# Altium footprint library WE-SHCA.PcbLib: 44 footprints (part 3 of 3)
Each footprint in its own frame and in the unit in brackets; x right, y up, seen from the top. Pads: shape width x height; smd on the part's side, far side on the other; paste and mask are expansions set on the pad; w line width, h text height; cw(c..) or ccw(c..) is an arc to the next point about the centre after c.
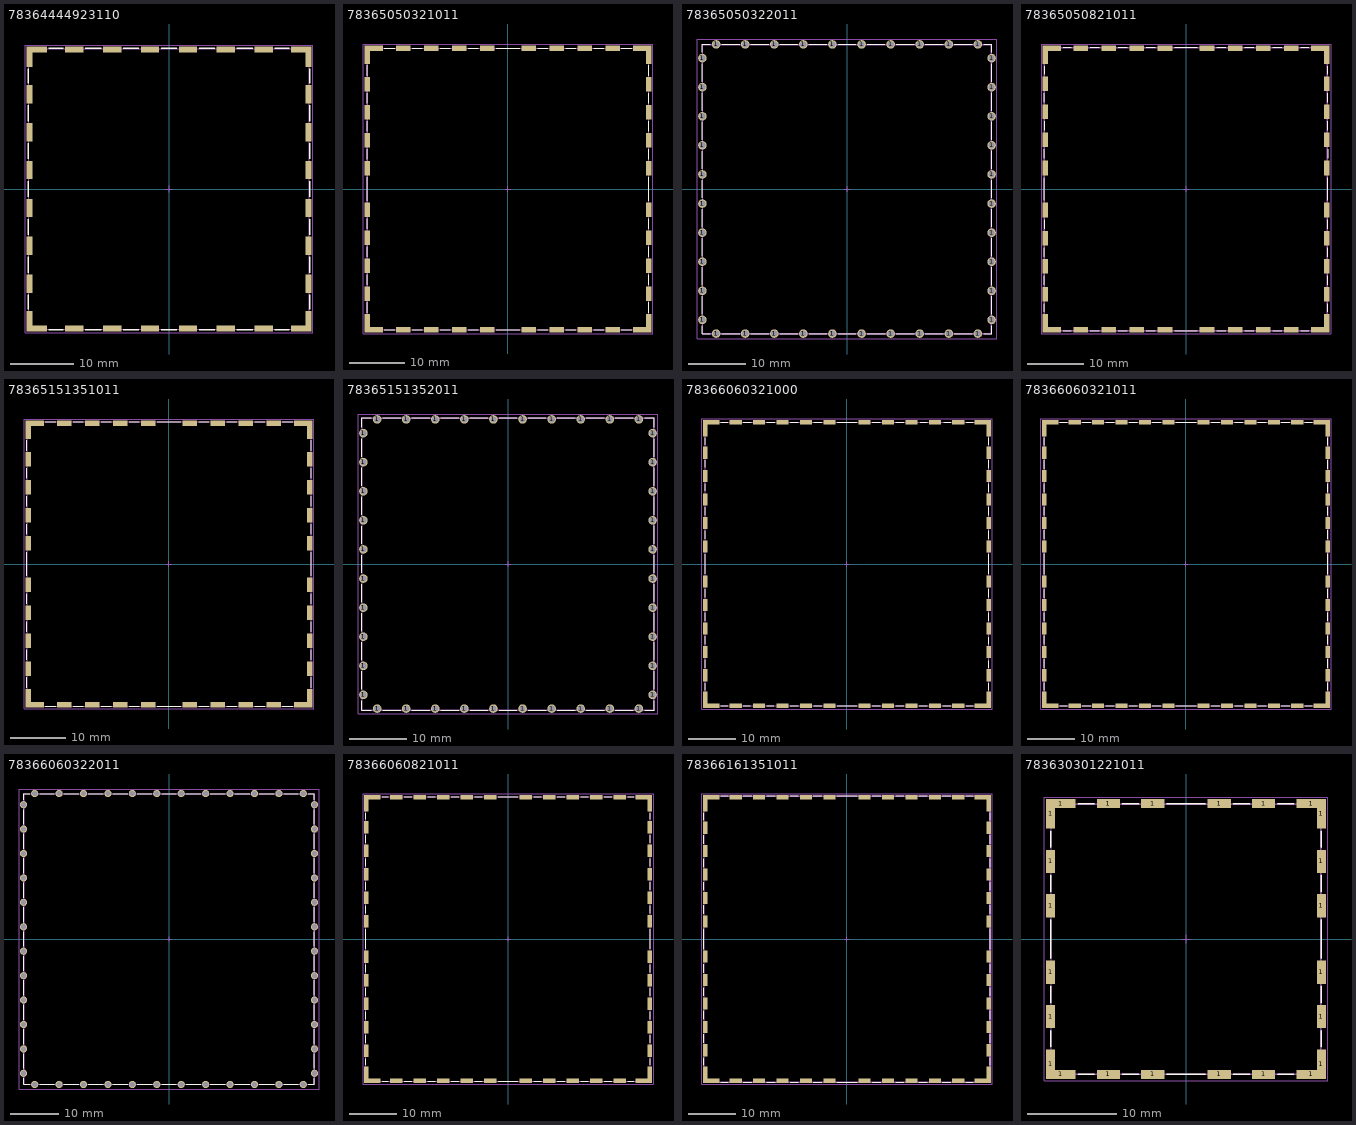
[diagram p2: the footprints below, top view; thin cyan lines are the x and y axes]

## 78364444923110 [mm] "Shielding Cabinet, body 44.37x44.37mm"
height 9.85
pads (32):
  rect 1x3.3 smd: 1(-22.08,-20.93) 1(-22.08,20.93) 1(22.08,-20.93) 1(22.08,20.93)
  rect 1x2.9 smd: 1(-22.08,-15) 1(-22.08,-9) 1(-22.08,-3) 1(-22.08,3) 1(-22.08,9) 1(-22.08,15) 1(22.08,-15) 1(22.08,-9) 1(22.08,-3) 1(22.08,3) 1(22.08,9) 1(22.08,15)
  rect 3.3x1 smd: 1(-20.93,-22.08) 1(-20.93,22.08) 1(20.93,-22.08) 1(20.93,22.08)
  rect 2.9x1 smd: 1(-15,-22.08) 1(-15,22.08) 1(-9,-22.08) 1(-9,22.08) 1(-3,-22.08) 1(-3,22.08) 1(3,-22.08) 1(3,22.08) 1(9,-22.08) 1(9,22.08) 1(15,-22.08) 1(15,22.08)
Top Overlay:
  lines w0.2: -22.235,-19 -22.235,-16.75 ; -22.235,-13.25 -22.235,-10.75 ; -22.235,-7.25 -22.235,-4.75 ; -22.235,-1.25 -22.235,1.25 ; -22.235,4.75 -22.235,7.25 ; -22.235,10.75 -22.235,13.25 ; -22.235,16.75 -22.235,19 ; -19,-22.235 -16.75,-22.235 ; -19,22.235 -16.75,22.235 ; -13.25,-22.235 -10.75,-22.235 ; -13.25,22.235 -10.75,22.235 ; -7.25,-22.235 -4.75,-22.235 ; -7.25,22.235 -4.75,22.235 ; -1.25,-22.235 1.25,-22.235 ; -1.25,22.235 1.25,22.235 ; 4.75,-22.235 7.25,-22.235 ; 4.75,22.235 7.25,22.235 ; 10.75,-22.235 13.25,-22.235 ; 10.75,22.235 13.25,22.235 ; 16.75,-22.235 19,-22.235 ; 16.75,22.235 19,22.235 ; 22.235,-19 22.235,-16.75 ; 22.235,-13.25 22.235,-10.75 ; 22.235,-7.25 22.235,-4.75 ; 22.235,-1.25 22.235,1.25 ; 22.235,4.75 22.235,7.25 ; 22.235,10.75 22.235,13.25 ; 22.235,16.75 22.235,19
Top Assembly:
  lines w0.1: -22.185,-22.185 22.185,-22.185 22.185,22.185 -22.185,22.185 -22.185,-22.185
Top Designator:
  text ".Designator" at -3.647,-0.357 h1
Top 3D Body:
  lines w0.1: -22.185,-22.185 -22.185,22.185 22.185,22.185 22.185,-22.185 -22.185,-22.185
Top Courtyard:
  lines w0.05: -22.78,-22.78 22.78,-22.78 22.78,0 22.78,22.78 -22.78,22.78 -22.78,-22.78
Top Component Center:
  lines w0.1: -0.5,0 0.5,0 ; 0,-0.5 0,0.5
3D body "36907406S.stp": height 9.75, standoff 0, extent -22.185,-22.185 22.185,22.185

## 78365050321011 [mm] "Shielding Cabinet, SMD Frame, 50.4x50.4mm"
height 3.2
pads (40):
  rect 1x3.3 smd: 1(-25.25,-24.1) 1(-25.25,24.1) 1(25.25,-24.1) 1(25.25,24.1)
  rect 1x2.6 smd: 1(-25.25,-18.75) 1(-25.25,-13.75) 1(-25.25,-8.75) 1(-25.25,-3.75) 1(-25.25,3.75) 1(-25.25,8.75) 1(-25.25,13.75) 1(-25.25,18.75) 1(25.25,-18.75) 1(25.25,-13.75) 1(25.25,-8.75) 1(25.25,-3.75) 1(25.25,3.75) 1(25.25,8.75) 1(25.25,13.75) 1(25.25,18.75)
  rect 3.3x1 smd: 1(-24.1,-25.25) 1(-24.1,25.25) 1(24.1,-25.25) 1(24.1,25.25)
  rect 2.6x1 smd: 1(-18.75,-25.25) 1(-18.75,25.25) 1(-13.75,-25.25) 1(-13.75,25.25) 1(-8.75,-25.25) 1(-8.75,25.25) 1(-3.75,-25.25) 1(-3.75,25.25) 1(3.75,-25.25) 1(3.75,25.25) 1(8.75,-25.25) 1(8.75,25.25) 1(13.75,-25.25) 1(13.75,25.25) 1(18.75,-25.25) 1(18.75,25.25)
Top Overlay:
  lines w0.2: -25.25,-22.15 -25.25,-20.35 ; -25.25,-17.15 -25.25,-15.35 ; -25.25,-12.15 -25.25,-10.35 ; -25.25,-7.15 -25.25,-5.35 ; -25.25,-2.15 -25.25,2.15 ; -25.25,5.35 -25.25,7.15 ; -25.25,10.35 -25.25,12.15 ; -25.25,15.35 -25.25,17.15 ; -25.25,20.35 -25.25,22.15 ; -22.15,-25.25 -20.35,-25.25 ; -22.15,25.25 -20.35,25.25 ; -17.15,-25.25 -15.35,-25.25 ; -17.15,25.25 -15.35,25.25 ; -12.15,-25.25 -10.35,-25.25 ; -12.15,25.25 -10.35,25.25 ; -7.15,-25.25 -5.35,-25.25 ; -7.15,25.25 -5.35,25.25 ; -2.15,-25.25 2.15,-25.25 ; -2.15,25.25 2.15,25.25 ; 5.35,-25.25 7.15,-25.25 ; 5.35,25.25 7.15,25.25 ; 10.35,-25.25 12.15,-25.25 ; 10.35,25.25 12.15,25.25 ; 15.35,-25.25 17.15,-25.25 ; 15.35,25.25 17.15,25.25 ; 20.35,-25.25 22.15,-25.25 ; 20.35,25.25 22.15,25.25 ; 25.25,-22.15 25.25,-20.35 ; 25.25,-17.15 25.25,-15.35 ; 25.25,-12.15 25.25,-10.35 ; 25.25,-7.15 25.25,-5.35 ; 25.25,-2.15 25.25,2.15 ; 25.25,5.35 25.25,7.15 ; 25.25,10.35 25.25,12.15 ; 25.25,15.35 25.25,17.15 ; 25.25,20.35 25.25,22.15
Top Assembly:
  lines w0.1: -25.25,-25.25 -25.25,25.25 25.25,25.25 25.25,-25.25 -25.25,-25.25
Top Designator:
  text ".Designator" at -3.647,-0.357 h1
Top 3D Body:
  lines w0.1: -25.2,-25.2 25.2,-25.2 25.2,25.2 -25.2,25.2 -25.2,-25.2
Top Courtyard:
  lines w0.05: -25.95,-25.95 -25.95,25.95 25.95,25.95 25.95,-25.95 -25.95,-25.95
Top Component Center:
  lines w0.1: -0.5,0 0.5,0 ; 0,-0.5 0,0.5
3D body "78365050321011.stp": height 3.2, standoff 0, extent -25.2,-25.2 25.2,25.2

## 78365050322011 [mm] "Shielding Cabinet, THT Frame, body 50.4x50.4mm"
height 3.3
pads (40):
  round 1.5 hole 1.1: 1(-25.25,-22.86) 1(-25.25,-17.78) 1(-25.25,-12.7) 1(-25.25,-7.62) 1(-25.25,-2.54) 1(-25.25,2.54) 1(-25.25,7.62) 1(-25.25,12.7) 1(-25.25,17.78) 1(-25.25,22.86) 1(-22.86,-25.25) 1(-22.86,25.25) 1(-17.78,-25.25) 1(-17.78,25.25) 1(-12.7,-25.25) 1(-12.7,25.25) 1(-7.62,-25.25) 1(-7.62,25.25) 1(-2.54,-25.25) 1(-2.54,25.25) 1(2.54,-25.25) 1(2.54,25.25) 1(7.62,-25.25) 1(7.62,25.25) 1(12.7,-25.25) 1(12.7,25.25) 1(17.78,-25.25) 1(17.78,25.25) 1(22.86,-25.25) 1(22.86,25.25) 1(25.25,-22.86) 1(25.25,-17.78) 1(25.25,-12.7) 1(25.25,-7.62) 1(25.25,-2.54) 1(25.25,2.54) 1(25.25,7.62) 1(25.25,12.7) 1(25.25,17.78) 1(25.25,22.86)
Top Overlay:
  lines w0.2: -25.25,-23.85 -25.25,-25.25 -23.85,-25.25 ; -25.25,-21.87 -25.25,-18.75 ; -25.25,-16.81 -25.25,-13.69 ; -25.25,-11.73 -25.25,-8.61 ; -25.25,-6.65 -25.25,-3.53 ; -25.25,-1.57 -25.25,1.55 ; -25.25,3.51 -25.25,6.63 ; -25.25,8.59 -25.25,11.71 ; -25.25,13.67 -25.25,16.79 ; -25.25,18.75 -25.25,21.87 ; -25.25,23.85 -25.25,25.25 -23.85,25.25 ; -21.87,-25.25 -18.75,-25.25 ; -21.87,25.25 -18.75,25.25 ; -16.81,25.25 -13.69,25.25 ; -16.79,-25.25 -13.67,-25.25 ; -11.73,25.25 -8.61,25.25 ; -11.71,-25.25 -8.59,-25.25 ; -6.65,25.25 -3.53,25.25 ; -6.63,-25.25 -3.51,-25.25 ; -1.57,25.25 1.55,25.25 ; -1.55,-25.25 1.57,-25.25 ; 3.51,25.25 6.63,25.25 ; 3.53,-25.25 6.65,-25.25 ; 8.59,25.25 11.71,25.25 ; 8.61,-25.25 11.73,-25.25 ; 13.67,25.25 16.79,25.25 ; 13.69,-25.25 16.81,-25.25 ; 18.75,-25.25 21.87,-25.25 ; 18.75,25.25 21.87,25.25 ; 23.85,-25.25 25.25,-25.25 25.25,-23.85 ; 23.85,25.25 25.25,25.25 25.25,23.85 ; 25.25,-21.87 25.25,-18.75 ; 25.25,-16.79 25.25,-13.67 ; 25.25,-11.71 25.25,-8.59 ; 25.25,-6.63 25.25,-3.51 ; 25.25,-1.55 25.25,1.57 ; 25.25,3.53 25.25,6.65 ; 25.25,8.61 25.25,11.73 ; 25.25,13.69 25.25,16.81 ; 25.25,18.75 25.25,21.87
Top Assembly:
  lines w0.1: -25.25,-25.25 25.25,-25.25 25.25,25.25 -25.25,25.25 -25.25,-25.25
Top Designator:
  text ".Designator" at -3.647,-0.357 h1
Top 3D Body:
  lines w0.1: -25.2,-25.2 -25.2,25.2 25.2,25.2 25.2,-25.2 -25.2,-25.2
Top Courtyard:
  lines w0.05: -26.2,-26.2 26.2,-26.2 26.2,26.2 -26.2,26.2 -26.2,-26.2
Top Component Center:
  lines w0.1: -0.5,0 0.5,0 ; 0,-0.5 0,0.5
3D body "36503505S.stp": height 3.23, standoff -2.87, extent -25.2,-25.2 25.2,25.2

## 78365050821011 [mm] "WE-SHC Shielding Cabinet"
height 8
pads (40):
  rect 1x2.6 smd: 1(-25.1,-18.75) 1(-25.1,-8.75) 1(-25.1,-3.75) 1(-25.1,3.75) 1(-25.1,8.75) 1(-25.1,13.75) 1(-25.1,18.75) 1(-25.1,-13.75) 1(25.1,-13.75) 1(25.1,13.75) 1(25.1,-18.75) 1(25.1,-8.75) 1(25.1,-3.75) 1(25.1,3.75) 1(25.1,8.75) 1(25.1,18.75)
  rect 1x3.3 smd: 1(-25.1,-23.95) 1(-25.1,23.95) 1(25.1,-23.95) 1(25.1,23.95)
  rect 3.3x1 smd: 1(-23.95,-25.1) 1(-23.95,25.1) 1(23.95,-25.1) 1(23.95,25.1)
  rect 2.6x1 smd: 1(-18.75,-25.1) 1(-18.75,25.1) 1(-13.75,-25.1) 1(-13.75,25.1) 1(-8.75,-25.1) 1(-8.75,25.1) 1(-3.75,25.1) 1(-3.75,-25.1) 1(3.75,-25.1) 1(3.75,25.1) 1(8.75,-25.1) 1(8.75,25.1) 1(13.75,-25.1) 1(13.75,25.1) 1(18.75,-25.1) 1(18.75,25.1)
Top Overlay:
  lines w0.2: -25.25,-21.9 -25.25,-20.45 ; -25.25,-17.05 -25.25,-15.45 ; -25.25,-12.05 -25.25,-10.45 ; -25.25,-7.05 -25.25,-5.45 ; -25.25,-2.05 -25.25,2.05 ; -25.25,5.45 -25.25,7.05 ; -25.25,10.45 -25.25,12.05 ; -25.25,15.45 -25.25,17.05 ; -25.25,20.45 -25.25,21.9 ; -21.9,-25.25 -20.45,-25.25 ; -21.9,25.25 -20.45,25.25 ; -17.05,-25.25 -15.45,-25.25 ; -17.05,25.25 -15.45,25.25 ; -12.05,-25.25 -10.45,-25.25 ; -12.05,25.25 -10.45,25.25 ; -7.05,-25.25 -5.45,-25.25 ; -7.05,25.25 -5.45,25.25 ; -2.05,-25.25 2.05,-25.25 ; -2.05,25.25 2.05,25.25 ; 5.45,-25.25 7.05,-25.25 ; 5.45,25.25 7.05,25.25 ; 10.45,-25.25 12.05,-25.25 ; 10.45,25.25 12.05,25.25 ; 15.45,-25.25 17.05,-25.25 ; 15.45,25.25 17.05,25.25 ; 20.45,-25.25 21.9,-25.25 ; 20.45,25.25 21.9,25.25 ; 25.25,-21.9 25.25,-20.45 ; 25.25,-17.05 25.25,-15.45 ; 25.25,-12.05 25.25,-10.45 ; 25.25,-7.05 25.25,-5.45 ; 25.25,-2.05 25.25,2.05 ; 25.25,5.45 25.25,7.05 ; 25.25,10.45 25.25,12.05 ; 25.25,15.45 25.25,17.05 ; 25.25,20.45 25.25,21.9
Top Assembly:
  lines w0.1: -25.25,-25.25 -25.25,25.25 25.25,25.25 25.25,-25.25 -25.25,-25.25
Top Designator:
  text ".Designator" at -3.647,-0.357 h1
Top 3D Body:
  lines w0.1: -25.2,-25.2 -25.2,25.2 25.2,25.2 25.2,-25.2 -25.2,-25.2
Top Courtyard:
  lines w0.05: -25.8,-25.8 -25.8,25.8 25.8,25.8 25.8,-25.8 -25.8,-25.8
Top Component Center:
  lines w0.1: -0.5,0 0.5,0 ; 0,-0.5 0,0.5
3D body "78365050821011.stp": height 8, standoff 0, extent -25.2,-25.2 25.2,25.2

## 78365151351011 [mm] "Shielding Cabinet, SMD Frame, body 51x51mm"
height 3.6
pads (40):
  rect 1x3.3 smd: 1(-25.25,-24.1) 1(-25.25,24.1) 1(25.25,-24.1) 1(25.25,24.1)
  rect 1x2.6 smd: 1(-25.25,-18.75) 1(-25.25,-13.75) 1(-25.25,-8.75) 1(-25.25,-3.75) 1(-25.25,3.75) 1(-25.25,8.75) 1(-25.25,13.75) 1(-25.25,18.75) 1(25.25,-18.75) 1(25.25,-13.75) 1(25.25,-8.75) 1(25.25,-3.75) 1(25.25,3.75) 1(25.25,8.75) 1(25.25,13.75) 1(25.25,18.75)
  rect 3.3x1 smd: 1(-24.1,-25.25) 1(-24.1,25.25) 1(24.1,-25.25) 1(24.1,25.25)
  rect 2.6x1 smd: 1(-18.75,-25.25) 1(-18.75,25.25) 1(-13.75,-25.25) 1(-13.75,25.25) 1(-8.75,-25.25) 1(-8.75,25.25) 1(-3.75,-25.25) 1(-3.75,25.25) 1(3.75,-25.25) 1(3.75,25.25) 1(8.75,-25.25) 1(8.75,25.25) 1(13.75,-25.25) 1(13.75,25.25) 1(18.75,-25.25) 1(18.75,25.25)
Top Overlay:
  lines w0.2: -25.55,-22.15 -25.55,-20.35 ; -25.55,-17.15 -25.55,-15.35 ; -25.55,-12.15 -25.55,-10.35 ; -25.55,-7.15 -25.55,-5.35 ; -25.55,-2.15 -25.55,2.15 ; -25.55,5.35 -25.55,7.15 ; -25.55,10.35 -25.55,12.15 ; -25.55,15.35 -25.55,17.15 ; -25.55,20.35 -25.55,22.15 ; -22.15,-25.55 -20.35,-25.55 ; -22.15,25.55 -20.35,25.55 ; -17.15,-25.55 -15.35,-25.55 ; -17.15,25.55 -15.35,25.55 ; -12.15,-25.55 -10.35,-25.55 ; -12.15,25.55 -10.35,25.55 ; -7.15,-25.55 -5.35,-25.55 ; -7.15,25.55 -5.35,25.55 ; -2.15,-25.55 2.15,-25.55 ; -2.15,25.55 2.15,25.55 ; 5.35,-25.55 7.15,-25.55 ; 5.35,25.55 7.15,25.55 ; 10.35,-25.55 12.15,-25.55 ; 10.35,25.55 12.15,25.55 ; 15.35,-25.55 17.15,-25.55 ; 15.35,25.55 17.15,25.55 ; 20.35,-25.55 22.15,-25.55 ; 20.35,25.55 22.15,25.55 ; 25.55,-22.15 25.55,-20.35 ; 25.55,-17.15 25.55,-15.35 ; 25.55,-12.15 25.55,-10.35 ; 25.55,-7.15 25.55,-5.35 ; 25.55,-2.15 25.55,2.15 ; 25.55,5.35 25.55,7.15 ; 25.55,10.35 25.55,12.15 ; 25.55,15.35 25.55,17.15 ; 25.55,20.35 25.55,22.15
Top Assembly:
  lines w0.1: -25.55,-25.55 -25.55,25.55 25.55,25.55 25.55,-25.55 -25.55,-25.55
Top Designator:
  text ".Designator" at -3.647,-0.357 h1
Top 3D Body:
  lines w0.1: -25.5,-25.5 25.5,-25.5 25.5,25.5 -25.5,25.5 -25.5,-25.5
Top Courtyard:
  lines w0.05: -25.95,-25.95 25.95,-25.95 25.95,25.95 -25.95,25.95 -25.95,-25.95
Top Component Center:
  lines w0.1: -0.5,0 0.5,0 ; 0,-0.5 0,0.5
3D body "78365151351011.stp": height 3.5, standoff 0, extent -25.5,-25.5 25.5,25.5

## 78365151352011 [mm] "Shielding Cabinet, THT Frame, body 51x51mm"
height 3.6
pads (40):
  round 1.5 hole 1.1: 1(-25.25,-22.86) 1(-25.25,-17.78) 1(-25.25,-12.7) 1(-25.25,-7.62) 1(-25.25,-2.54) 1(-25.25,2.54) 1(-25.25,7.62) 1(-25.25,12.7) 1(-25.25,17.78) 1(-25.25,22.86) 1(-22.86,-25.25) 1(-22.86,25.25) 1(-17.78,-25.25) 1(-17.78,25.25) 1(-12.7,-25.25) 1(-12.7,25.25) 1(-7.62,-25.25) 1(-7.62,25.25) 1(-2.54,-25.25) 1(-2.54,25.25) 1(2.54,-25.25) 1(2.54,25.25) 1(7.62,-25.25) 1(7.62,25.25) 1(12.7,-25.25) 1(12.7,25.25) 1(17.78,-25.25) 1(17.78,25.25) 1(22.86,-25.25) 1(22.86,25.25) 1(25.25,-22.86) 1(25.25,-17.78) 1(25.25,-12.7) 1(25.25,-7.62) 1(25.25,-2.54) 1(25.25,2.54) 1(25.25,7.62) 1(25.25,12.7) 1(25.25,17.78) 1(25.25,22.86)
Top Overlay:
  lines w0.2: -25.55,-23.85 -25.55,-25.55 -23.85,-25.55 ; -25.55,-21.87 -25.55,-18.75 ; -25.55,-16.81 -25.55,-13.69 ; -25.55,-11.73 -25.55,-8.61 ; -25.55,-6.65 -25.55,-3.53 ; -25.55,-1.57 -25.55,1.55 ; -25.55,3.51 -25.55,6.63 ; -25.55,8.59 -25.55,11.71 ; -25.55,13.67 -25.55,16.79 ; -25.55,18.75 -25.55,21.87 ; -25.55,23.85 -25.55,25.55 -23.85,25.55 ; -21.87,-25.55 -18.75,-25.55 ; -21.87,25.55 -18.75,25.55 ; -16.81,25.55 -13.69,25.55 ; -16.79,-25.55 -13.67,-25.55 ; -11.73,25.55 -8.61,25.55 ; -11.71,-25.55 -8.59,-25.55 ; -6.65,25.55 -3.53,25.55 ; -6.63,-25.55 -3.51,-25.55 ; -1.57,25.55 1.55,25.55 ; -1.55,-25.55 1.57,-25.55 ; 3.51,25.55 6.63,25.55 ; 3.53,-25.55 6.65,-25.55 ; 8.59,25.55 11.71,25.55 ; 8.61,-25.55 11.73,-25.55 ; 13.67,25.55 16.79,25.55 ; 13.69,-25.55 16.81,-25.55 ; 18.75,-25.55 21.87,-25.55 ; 18.75,25.55 21.87,25.55 ; 23.85,-25.55 25.55,-25.55 25.55,-23.85 ; 23.85,25.55 25.55,25.55 25.55,23.85 ; 25.55,-21.87 25.55,-18.75 ; 25.55,-16.79 25.55,-13.67 ; 25.55,-11.71 25.55,-8.59 ; 25.55,-6.63 25.55,-3.51 ; 25.55,-1.55 25.55,1.57 ; 25.55,3.53 25.55,6.65 ; 25.55,8.61 25.55,11.73 ; 25.55,13.69 25.55,16.81 ; 25.55,18.75 25.55,21.87
Top Assembly:
  lines w0.1: -25.55,-25.55 25.55,-25.55 25.55,25.55 -25.55,25.55 -25.55,-25.55
Top Designator:
  text ".Designator" at -3.647,-0.357 h1
Top 3D Body:
  lines w0.1: -25.5,-25.5 -25.5,25.5 25.5,25.5 25.5,-25.5 -25.5,-25.5
Top Courtyard:
  lines w0.05: -26.2,-26.2 26.2,-26.2 26.2,26.2 -26.2,26.2 -26.2,-26.2
Top Component Center:
  lines w0.1: -0.5,0 0.5,0 ; 0,-0.5 0,0.5
3D body "78365151352011.stp": height 3.5, standoff -2.9, extent -25.5,-25.5 25.5,25.5

## 78366060321000 [mm] "Shielding Cabinet, SMD Frame, body 60.4 x 60.4 mm"
height 3.2
pads (48):
  rect 1x3.5 smd: 1(-30.25,-29) 1(-30.25,29) 1(30.25,-29) 1(30.25,29)
  rect 1x2.6 smd: 1(-30.25,-23.75) 1(-30.25,-18.75) 1(-30.25,-13.75) 1(-30.25,-8.75) 1(-30.25,-3.75) 1(-30.25,3.75) 1(-30.25,8.75) 1(-30.25,13.75) 1(-30.25,18.75) 1(-30.25,23.75) 1(30.25,-23.75) 1(30.25,-18.75) 1(30.25,-13.75) 1(30.25,-8.75) 1(30.25,-3.75) 1(30.25,3.75) 1(30.25,8.75) 1(30.25,13.75) 1(30.25,18.75) 1(30.25,23.75)
  rect 3.5x1 smd: 1(-29,-30.25) 1(-29,30.25) 1(29,-30.25) 1(29,30.25)
  rect 2.6x1 smd: 1(-23.75,-30.25) 1(-23.75,30.25) 1(-18.75,-30.25) 1(-18.75,30.25) 1(-13.75,-30.25) 1(-13.75,30.25) 1(-8.75,-30.25) 1(-8.75,30.25) 1(-3.75,-30.25) 1(-3.75,30.25) 1(3.75,-30.25) 1(3.75,30.25) 1(8.75,-30.25) 1(8.75,30.25) 1(13.75,-30.25) 1(13.75,30.25) 1(18.75,-30.25) 1(18.75,30.25) 1(23.75,-30.25) 1(23.75,30.25)
Top Overlay:
  lines w0.2: -30.25,-26.9 -30.25,-25.4 ; -30.25,-22.1 -30.25,-20.4 ; -30.25,-17.1 -30.25,-15.4 ; -30.25,-12.1 -30.25,-10.4 ; -30.25,-7.1 -30.25,-5.4 ; -30.25,-2.1 -30.25,2.1 ; -30.25,5.4 -30.25,7.1 ; -30.25,10.4 -30.25,12.1 ; -30.25,15.6 -30.25,17.1 ; -30.25,20.6 -30.25,22.1 ; -30.25,25.4 -30.25,26.9 ; -26.9,-30.25 -25.4,-30.25 ; -26.9,30.25 -25.4,30.25 ; -22.1,-30.25 -20.6,-30.25 ; -22.1,30.25 -20.4,30.25 ; -17.1,-30.25 -15.6,-30.25 ; -17.1,30.25 -15.4,30.25 ; -12.1,-30.25 -10.4,-30.25 ; -12.1,30.25 -10.4,30.25 ; -7.1,-30.25 -5.4,-30.25 ; -7.1,30.25 -5.4,30.25 ; -2.1,-30.25 2.1,-30.25 ; -2.1,30.25 2.1,30.25 ; 5.4,-30.25 7.1,-30.25 ; 5.4,30.25 7.1,30.25 ; 10.4,-30.25 12.1,-30.25 ; 10.4,30.25 12.1,30.25 ; 15.4,-30.25 17.1,-30.25 ; 15.6,30.25 17.1,30.25 ; 20.4,-30.25 22.1,-30.25 ; 20.6,30.25 22.1,30.25 ; 25.4,-30.25 26.9,-30.25 ; 25.4,30.25 26.9,30.25 ; 30.25,-26.9 30.25,-25.4 ; 30.25,-22.1 30.25,-20.6 ; 30.25,-17.1 30.25,-15.6 ; 30.25,-12.1 30.25,-10.4 ; 30.25,-7.1 30.25,-5.4 ; 30.25,-2.1 30.25,2.1 ; 30.25,5.4 30.25,7.1 ; 30.25,10.4 30.25,12.1 ; 30.25,15.4 30.25,17.1 ; 30.25,20.4 30.25,22.1 ; 30.25,25.4 30.25,26.9
Top Assembly:
  lines w0.1: -30.25,-30.25 -30.25,30.25 30.25,30.25 30.25,-30.25 -30.25,-30.25
Top Designator:
  text ".Designator" at -3.647,-0.357 h1
Top 3D Body:
  lines w0.1: -30.2,-30.2 -30.2,30.2 30.2,30.2 30.2,-30.2 -30.2,-30.2
Top Courtyard:
  lines w0.05: -30.95,-30.95 -30.95,30.95 30.95,30.95 30.95,-30.95 -30.95,-30.95
Top Component Center:
  lines w0.1: -0.5,0 0.5,0 ; 0,-0.5 0,0.5
3D body "78366060321000.stp": height 3.22, standoff 0.02, extent -30.2,-30 30.2,30

## 78366060321011 [mm] "Shielding Cabinet, SMD Frame, 60.4x60.4mm"
height 3.5
pads (48):
  rect 1x3.5 smd: 1(-30.25,-29) 1(-30.25,29) 1(30.25,-29) 1(30.25,29)
  rect 1x2.6 smd: 1(-30.25,-23.75) 1(-30.25,-18.75) 1(-30.25,-13.75) 1(-30.25,-8.75) 1(-30.25,-3.75) 1(-30.25,3.75) 1(-30.25,8.75) 1(-30.25,13.75) 1(-30.25,18.75) 1(-30.25,23.75) 1(30.25,-23.75) 1(30.25,-18.75) 1(30.25,-13.75) 1(30.25,-8.75) 1(30.25,-3.75) 1(30.25,3.75) 1(30.25,8.75) 1(30.25,13.75) 1(30.25,18.75) 1(30.25,23.75)
  rect 3.5x1 smd: 1(-29,-30.25) 1(-29,30.25) 1(29,-30.25) 1(29,30.25)
  rect 2.6x1 smd: 1(-23.75,-30.25) 1(-23.75,30.25) 1(-18.75,-30.25) 1(-18.75,30.25) 1(-13.75,-30.25) 1(-13.75,30.25) 1(-8.75,-30.25) 1(-8.75,30.25) 1(-3.75,-30.25) 1(-3.75,30.25) 1(3.75,-30.25) 1(3.75,30.25) 1(8.75,-30.25) 1(8.75,30.25) 1(13.75,-30.25) 1(13.75,30.25) 1(18.75,-30.25) 1(18.75,30.25) 1(23.75,-30.25) 1(23.75,30.25)
Top Overlay:
  lines w0.2: -30.25,-26.95 -30.25,-25.35 ; -30.25,-22.15 -30.25,-20.35 ; -30.25,-17.15 -30.25,-15.35 ; -30.25,-12.15 -30.25,-10.35 ; -30.25,-7.15 -30.25,-5.35 ; -30.25,-2.15 -30.25,2.15 ; -30.25,5.35 -30.25,7.15 ; -30.25,10.35 -30.25,12.15 ; -30.25,15.35 -30.25,17.15 ; -30.25,20.35 -30.25,22.15 ; -30.25,25.35 -30.25,26.95 ; -26.95,-30.25 -25.35,-30.25 ; -26.95,30.25 -25.35,30.25 ; -22.15,-30.25 -20.35,-30.25 ; -22.15,30.25 -20.35,30.25 ; -17.15,-30.25 -15.35,-30.25 ; -17.15,30.25 -15.35,30.25 ; -12.15,-30.25 -10.35,-30.25 ; -12.15,30.25 -10.35,30.25 ; -7.15,-30.25 -5.35,-30.25 ; -7.15,30.25 -5.35,30.25 ; -2.15,-30.25 2.15,-30.25 ; -2.15,30.25 2.15,30.25 ; 5.35,-30.25 7.15,-30.25 ; 5.35,30.25 7.15,30.25 ; 10.35,-30.25 12.15,-30.25 ; 10.35,30.25 12.15,30.25 ; 15.35,-30.25 17.15,-30.25 ; 15.35,30.25 17.15,30.25 ; 20.35,-30.25 22.15,-30.25 ; 20.35,30.25 22.15,30.25 ; 25.35,-30.25 26.95,-30.25 ; 25.35,30.25 26.95,30.25 ; 30.25,-26.95 30.25,-25.35 ; 30.25,-22.15 30.25,-20.35 ; 30.25,-17.15 30.25,-15.35 ; 30.25,-12.15 30.25,-10.35 ; 30.25,-7.15 30.25,-5.35 ; 30.25,-2.15 30.25,2.15 ; 30.25,5.35 30.25,7.15 ; 30.25,10.35 30.25,12.15 ; 30.25,15.35 30.25,17.15 ; 30.25,20.35 30.25,22.15 ; 30.25,25.35 30.25,26.95
Top Assembly:
  lines w0.1: -30.25,-30.25 30.25,-30.25 30.25,30.25 -30.25,30.25 -30.25,-30.25
Top Designator:
  text ".Designator" at -3.647,-0.357 h1
Top 3D Body:
  lines w0.1: -30.2,-30.2 -30.2,30.2 30.2,30.2 30.2,-30.2 -30.2,-30.2
Top Courtyard:
  lines w0.05: -30.95,-30.95 -30.95,30.95 30.95,30.95 30.95,-30.95 -30.95,-30.95
Top Component Center:
  lines w0.1: -0.5,0 0.5,0 ; 0,-0.5 0,0.5
3D body "36103605S.stp": height 3.2, standoff 0, extent -30.2,-30.2 30.2,30.2

## 78366060322011 [mm] "Shielding Cabinet, THT Frame, body 60.4x60.4mm"
height 3.3
pads (48):
  round 1.5 hole 1.1: 1(-30.25,-27.94) 1(-30.25,-22.86) 1(-30.25,-17.78) 1(-30.25,-12.7) 1(-30.25,-7.62) 1(-30.25,-2.54) 1(-30.25,2.54) 1(-30.25,7.62) 1(-30.25,12.7) 1(-30.25,17.78) 1(-30.25,22.86) 1(-30.25,27.94) 1(-27.94,-30.25) 1(-27.94,30.25) 1(-22.86,-30.25) 1(-22.86,30.25) 1(-17.78,-30.25) 1(-17.78,30.25) 1(-12.7,-30.25) 1(-12.7,30.25) 1(-7.62,-30.25) 1(-7.62,30.25) 1(-2.54,-30.25) 1(-2.54,30.25) 1(2.54,-30.25) 1(2.54,30.25) 1(7.62,-30.25) 1(7.62,30.25) 1(12.7,-30.25) 1(12.7,30.25) 1(17.78,-30.25) 1(17.78,30.25) 1(22.86,-30.25) 1(22.86,30.25) 1(27.94,-30.25) 1(27.94,30.25) 1(30.25,-27.94) 1(30.25,-22.86) 1(30.25,-17.78) 1(30.25,-12.7) 1(30.25,-7.62) 1(30.25,-2.54) 1(30.25,2.54) 1(30.25,7.62) 1(30.25,12.7) 1(30.25,17.78) 1(30.25,22.86) 1(30.25,27.94)
Top Overlay:
  lines w0.2: -30.25,-28.95 -30.25,-30.25 -28.95,-30.25 ; -30.25,-26.93 -30.25,-23.85 ; -30.25,-21.87 -30.25,-18.79 ; -30.25,-16.79 -30.25,-13.71 ; -30.25,-11.71 -30.25,-8.63 ; -30.25,-6.63 -30.25,-3.55 ; -30.25,-1.55 -30.25,1.53 ; -30.25,3.53 -30.25,6.61 ; -30.25,8.61 -30.25,11.69 ; -30.25,13.69 -30.25,16.77 ; -30.25,18.77 -30.25,21.85 ; -30.25,23.85 -30.25,26.93 ; -30.25,28.95 -30.25,30.25 -28.95,30.25 ; -26.93,-30.25 -23.85,-30.25 ; -26.93,30.25 -23.85,30.25 ; -21.87,30.25 -18.79,30.25 ; -21.85,-30.25 -18.77,-30.25 ; -16.79,30.25 -13.71,30.25 ; -16.77,-30.25 -13.69,-30.25 ; -11.71,30.25 -8.63,30.25 ; -11.69,-30.25 -8.61,-30.25 ; -6.63,30.25 -3.55,30.25 ; -6.61,-30.25 -3.53,-30.25 ; -1.55,30.25 1.53,30.25 ; -1.53,-30.25 1.55,-30.25 ; 3.53,30.25 6.61,30.25 ; 3.55,-30.25 6.63,-30.25 ; 8.61,30.25 11.69,30.25 ; 8.63,-30.25 11.71,-30.25 ; 13.69,30.25 16.77,30.25 ; 13.71,-30.25 16.79,-30.25 ; 18.77,30.25 21.85,30.25 ; 18.79,-30.25 21.87,-30.25 ; 23.85,-30.25 26.93,-30.25 ; 23.85,30.25 26.93,30.25 ; 28.95,-30.25 30.25,-30.25 30.25,-28.95 ; 28.95,30.25 30.25,30.25 30.25,28.95 ; 30.25,-26.93 30.25,-23.85 ; 30.25,-21.85 30.25,-18.77 ; 30.25,-16.77 30.25,-13.69 ; 30.25,-11.69 30.25,-8.61 ; 30.25,-6.61 30.25,-3.53 ; 30.25,-1.53 30.25,1.55 ; 30.25,3.55 30.25,6.63 ; 30.25,8.63 30.25,11.71 ; 30.25,13.71 30.25,16.79 ; 30.25,18.79 30.25,21.87 ; 30.25,23.85 30.25,26.93
Top Assembly:
  lines w0.1: -30.25,-30.25 -30.25,30.25 30.25,30.25 30.25,-30.25 -30.25,-30.25
Top Designator:
  text ".Designator" at -3.647,-0.357 h1
Top 3D Body:
  lines w0.1: -30.2,-30.2 30.2,-30.2 30.2,30.2 -30.2,30.2 -30.2,-30.2
Top Courtyard:
  lines w0.05: -31.2,-31.2 -31.2,31.2 31.2,31.2 31.2,-31.2 -31.2,-31.2
Top Component Center:
  lines w0.1: -0.5,0 0.5,0 ; 0,-0.5 0,0.5
3D body "36503605S.stp": height 3.2, standoff -2.9, extent -30.2,-30.2 30.2,30.2

## 78366060821011 [mm] "WE-SHC Shielding Cabinet"
height 8
pads (48):
  rect 1x2.6 smd: 1(-30.1,8.75) 1(-30.1,-23.75) 1(-30.1,-13.75) 1(-30.1,-8.75) 1(-30.1,-3.75) 1(-30.1,3.75) 1(-30.1,13.75) 1(-30.1,18.75) 1(-30.1,23.75) 1(-30.1,-18.75) 1(30.1,18.75) 1(30.1,-23.75) 1(30.1,-18.75) 1(30.1,-13.75) 1(30.1,-3.75) 1(30.1,3.75) 1(30.1,8.75) 1(30.1,13.75) 1(30.1,23.75) 1(30.1,-8.75)
  rect 1x3.5 smd: 1(-30.1,-28.85) 1(-30.1,28.85) 1(30.1,-28.85) 1(30.1,28.85)
  rect 3.5x1 smd: 1(-28.85,-30.1) 1(-28.85,30.1) 1(28.85,-30.1) 1(28.85,30.1)
  rect 2.6x1 smd: 1(-23.75,-30.1) 1(-23.75,30.1) 1(-18.75,-30.1) 1(-18.75,30.1) 1(-13.75,-30.1) 1(-13.75,30.1) 1(-8.75,-30.1) 1(-8.75,30.1) 1(-3.75,-30.1) 1(-3.75,30.1) 1(3.75,-30.1) 1(3.75,30.1) 1(8.75,-30.1) 1(8.75,30.1) 1(13.75,-30.1) 1(13.75,30.1) 1(18.75,-30.1) 1(18.75,30.1) 1(23.75,-30.1) 1(23.75,30.1)
Top Overlay:
  lines w0.2: -30.25,-26.7 -30.25,-25.45 ; -30.25,-22.05 -30.25,-20.45 ; -30.25,-17 -30.25,-15.45 ; -30.25,-12.05 -30.25,-10.45 ; -30.25,-7.05 -30.25,-5.45 ; -30.25,-2.05 -30.25,2.05 ; -30.25,5.45 -30.25,7.05 ; -30.25,10.45 -30.25,12.05 ; -30.25,17 -30.25,15.45 -30.25,17.05 ; -30.25,20.45 -30.25,22.05 ; -30.25,25.45 -30.25,26.7 ; -26.7,-30.25 -25.45,-30.25 ; -26.7,30.25 -25.45,30.25 ; -22.05,-30.25 -20.45,-30.25 ; -22.05,30.25 -20.45,30.25 ; -17,-30.25 -15.45,-30.25 ; -17,30.25 -15.45,30.25 ; -12.05,-30.25 -10.45,-30.25 ; -12.05,30.25 -10.45,30.25 ; -7.05,-30.25 -5.45,-30.25 ; -7.05,30.25 -5.45,30.25 ; -2.05,-30.25 2.05,-30.25 ; -2.05,30.25 2.05,30.25 ; 5.45,-30.25 7.05,-30.25 ; 5.45,30.25 7.05,30.25 ; 10.45,-30.25 12.05,-30.25 ; 10.45,30.25 12.05,30.25 ; 15.45,-30.25 17,-30.25 ; 15.45,30.25 17,30.25 ; 20.45,-30.25 22.05,-30.25 ; 20.45,30.25 22.05,30.25 ; 25.45,-30.25 26.7,-30.25 ; 25.45,30.25 26.7,30.25 ; 30.25,-26.7 30.25,-25.45 ; 30.25,-22.05 30.25,-20.45 ; 30.25,-17 30.25,-15.45 ; 30.25,-12.05 30.25,-10.45 ; 30.25,-7.05 30.25,-5.45 ; 30.25,-2.05 30.25,2.05 ; 30.25,5.45 30.25,7.05 ; 30.25,10.45 30.25,12.05 ; 30.25,15.45 30.25,17 ; 30.25,20.45 30.25,22.05 ; 30.25,25.45 30.25,26.7
Top Assembly:
  lines w0.1: -30.25,-30.25 -30.25,30.25 30.25,30.25 30.25,-30.25 -30.25,-30.25
Top Designator:
  text ".Designator" at -3.647,-0.357 h1
Top 3D Body:
  lines w0.1: -30.2,-30.2 -30.2,30.2 30.2,30.2 30.2,-30.2 -30.2,-30.2
Top Courtyard:
  lines w0.05: -30.8,-30.8 -30.8,30.8 30.8,30.8 30.8,-30.8 -30.8,-30.8
Top Component Center:
  lines w0.1: -0.5,0 0.5,0 ; 0,-0.5 0,0.5
3D body "78366060821011.stp": height 8, standoff 0, extent -30.2,-30.2 30.2,30.2

## 78366161351011 [mm] "Shielding Cabinet, SMD Frame, body 61x61mm"
height 3.5
pads (48):
  rect 1x3.5 smd: 1(-30.25,-29) 1(-30.25,29) 1(30.25,-29) 1(30.25,29)
  rect 1x2.6 smd: 1(-30.25,-23.75) 1(-30.25,-18.75) 1(-30.25,-13.75) 1(-30.25,-8.75) 1(-30.25,-3.75) 1(-30.25,3.75) 1(-30.25,8.75) 1(-30.25,13.75) 1(-30.25,18.75) 1(-30.25,23.75) 1(30.25,-23.75) 1(30.25,-18.75) 1(30.25,-13.75) 1(30.25,-8.75) 1(30.25,-3.75) 1(30.25,3.75) 1(30.25,8.75) 1(30.25,13.75) 1(30.25,18.75) 1(30.25,23.75)
  rect 3.5x1 smd: 1(-29,-30.25) 1(-29,30.25) 1(29,-30.25) 1(29,30.25)
  rect 2.6x1 smd: 1(-23.75,-30.25) 1(-23.75,30.25) 1(-18.75,-30.25) 1(-18.75,30.25) 1(-13.75,-30.25) 1(-13.75,30.25) 1(-8.75,-30.25) 1(-8.75,30.25) 1(-3.75,-30.25) 1(-3.75,30.25) 1(3.75,-30.25) 1(3.75,30.25) 1(8.75,-30.25) 1(8.75,30.25) 1(13.75,-30.25) 1(13.75,30.25) 1(18.75,-30.25) 1(18.75,30.25) 1(23.75,-30.25) 1(23.75,30.25)
Top Overlay:
  lines w0.2: -30.55,-26.95 -30.55,-25.35 ; -30.55,-22.15 -30.55,-20.35 ; -30.55,-17.15 -30.55,-15.35 ; -30.55,-12.15 -30.55,-10.35 ; -30.55,-7.15 -30.55,-5.35 ; -30.55,-2.15 -30.55,2.15 ; -30.55,5.35 -30.55,7.15 ; -30.55,10.35 -30.55,12.15 ; -30.55,15.35 -30.55,17.15 ; -30.55,20.35 -30.55,22.15 ; -30.55,25.35 -30.55,26.95 ; -26.95,-30.55 -25.35,-30.55 ; -26.95,30.55 -25.35,30.55 ; -22.15,-30.55 -20.35,-30.55 ; -22.15,30.55 -20.35,30.55 ; -17.15,-30.55 -15.35,-30.55 ; -17.15,30.55 -15.35,30.55 ; -12.15,-30.55 -10.35,-30.55 ; -12.15,30.55 -10.35,30.55 ; -7.15,-30.55 -5.35,-30.55 ; -7.15,30.55 -5.35,30.55 ; -2.15,-30.55 2.15,-30.55 ; -2.15,30.55 2.15,30.55 ; 5.35,-30.55 7.15,-30.55 ; 5.35,30.55 7.15,30.55 ; 10.35,-30.55 12.15,-30.55 ; 10.35,30.55 12.15,30.55 ; 15.35,-30.55 17.15,-30.55 ; 15.35,30.55 17.15,30.55 ; 20.35,-30.55 22.15,-30.55 ; 20.35,30.55 22.15,30.55 ; 25.35,-30.55 26.95,-30.55 ; 25.35,30.55 26.95,30.55 ; 30.55,-26.95 30.55,-25.35 ; 30.55,-22.15 30.55,-20.35 ; 30.55,-17.15 30.55,-15.35 ; 30.55,-12.15 30.55,-10.35 ; 30.55,-7.15 30.55,-5.35 ; 30.55,-2.15 30.55,2.15 ; 30.55,5.35 30.55,7.15 ; 30.55,10.35 30.55,12.15 ; 30.55,15.35 30.55,17.15 ; 30.55,20.35 30.55,22.15 ; 30.55,25.35 30.55,26.95
Top Assembly:
  lines w0.1: -30.55,-30.55 -30.55,30.55 30.55,30.55 30.55,-30.55 -30.55,-30.55
Top Designator:
  text ".Designator" at -3.647,-0.357 h1
Top 3D Body:
  lines w0.1: -30.5,-30.5 30.5,-30.5 30.5,30.5 -30.5,30.5 -30.5,-30.5
Top Courtyard:
  lines w0.05: -30.95,-30.95 -30.95,30.95 30.95,30.95 30.95,-30.95 -30.95,-30.95
Top Component Center:
  lines w0.1: -0.5,0 0.5,0 ; 0,-0.5 0,0.5
3D body "78366161351011.stp": height 3.5, standoff 0, extent -30.5,-30.5 30.5,30.5

## 783630301221011 [mm] "WE-SHC Shielding Cabinet"
height 12
pads (24):
  rect 1x3.3 smd: 1(-15.25,-14.1) 1(-15.25,14.1) 1(15.25,-14.1) 1(15.25,14.1)
  rect 1x2.6 smd: 1(-15.25,-8.75) 1(-15.25,-3.75) 1(-15.25,3.75) 1(-15.25,8.75) 1(15.25,-8.75) 1(15.25,-3.75) 1(15.25,3.75) 1(15.25,8.75)
  rect 3.3x1 smd: 1(-14.1,-15.25) 1(-14.1,15.25) 1(14.1,-15.25) 1(14.1,15.25)
  rect 2.6x1 smd: 1(-8.75,-15.25) 1(-8.75,15.25) 1(-3.75,-15.25) 1(-3.75,15.25) 1(3.75,-15.25) 1(3.75,15.25) 1(8.75,-15.25) 1(8.75,15.25)
Top Overlay:
  lines w0.2: -15.25,-12.15 -15.25,-10.35 ; -15.25,-7.15 -15.25,-5.35 ; -15.25,-2.15 -15.25,2.15 ; -15.25,5.35 -15.25,7.15 ; -15.25,10.35 -15.25,12.15 ; -12.15,-15.25 -10.35,-15.25 ; -12.15,15.25 -10.35,15.25 ; -7.15,-15.25 -5.35,-15.25 ; -7.15,15.25 -5.35,15.25 ; -2.15,-15.25 2.15,-15.25 ; -2.15,15.25 2.15,15.25 ; 5.35,-15.25 7.15,-15.25 ; 5.35,15.25 7.15,15.25 ; 10.35,-15.25 12.15,-15.25 ; 10.35,15.25 12.15,15.25 ; 15.25,-12.15 15.25,-10.35 ; 15.25,-7.15 15.25,-5.35 ; 15.25,-2.15 15.25,2.15 ; 15.25,5.35 15.25,7.15 ; 15.25,10.35 15.25,12.15
Top Assembly:
  lines w0.1: -15.25,-15.25 15.25,-15.25 15.25,15.25 -15.25,15.25 -15.25,-15.25
Top Designator:
  text ".Designator" at -3.647,-0.357 h1
Top 3D Body:
  lines w0.1: -15.2,-15.2 -15.2,15.2 15.2,15.2 15.2,-15.2 -15.2,-15.2
Top Courtyard:
  lines w0.05: -15.95,-15.95 15.95,-15.95 15.95,15.95 -15.95,15.95 -15.95,-15.95
Top Component Center:
  lines w0.1: -0.5,0 0.5,0 ; 0,-0.5 0,0.5
3D body "783630301221011.stp": height 12, standoff 0, extent -15.2,-15.2 15.2,15.2